# Altium footprint library BM10BSRSSTBLFSN.PcbLib: 1 footprints
Each footprint in its own frame and in the unit in brackets; x right, y up, seen from the top. Pads: shape width x height; smd on the part's side, far side on the other; paste and mask are expansions set on the pad; w line width, h text height; cw(c..) or ccw(c..) is an arc to the next point about the centre after c.
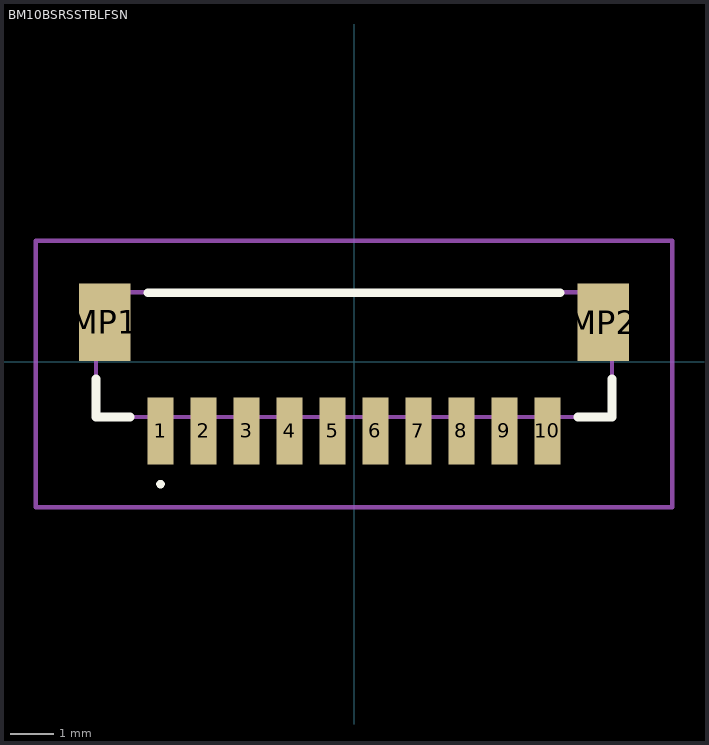
[diagram p0: the footprint, top view; thin cyan lines are the x and y axes]

## BM10BSRSSTBLFSN [mm]
pads (12):
  rect 0.6x1.55 smd: 1(-4.5,-1.613) 2(-3.5,-1.613) 3(-2.5,-1.613) 4(-1.5,-1.613) 5(-0.5,-1.613) 6(0.5,-1.613) 7(1.5,-1.613) 8(2.5,-1.613) 9(3.5,-1.613) 10(4.5,-1.613)
  rect 1.2x1.8 smd: MP1(-5.8,0.912) MP2(5.8,0.912)
Top Overlay:
  lines w0.1: -4.5,-2.9 -4.5,-2.9 ; -4.5,-2.9 ccw(c-4.5,-2.85) -4.5,-2.8 ; -4.5,-2.9 cw(c-4.5,-2.85) -4.5,-2.8 ; -4.5,-2.8 -4.5,-2.8
  lines w0.2: -6,-0.4 -6,-1.287 -5.2,-1.287 ; -4.8,1.6 4.8,1.6 ; 5.2,-1.287 6,-1.287 6,-0.4
Mechanical 15:
  lines w0.1: -6,-1.287 6,-1.287 6,1.613 -6,1.613 -6,-1.287
Mechanical 20:
  lines w0.1: -7.4,-3.388 7.4,-3.388 7.4,2.812 -7.4,2.812 -7.4,-3.388